# Altium schematic symbol library lri_symbols_sheet.SchLib: 1 symbol
Pins are listed as number, name and electrical type; pins without a type are passive.

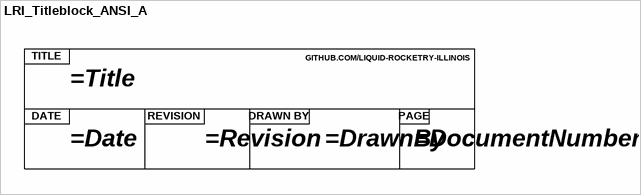
[diagram p0: symbol LRI_Titleblock_ANSI_A]

## LRI_Titleblock_ANSI_A
designator *  (value not drawn)  (graphical)
Default Altium titleblock for Liquid Rocketry @ Illinois.
text: GITHUB.COM/LIQUID-ROCKETRY-ILLINOIS; TITLE; DATE; REVISION; DRAWN BY; PAGE